# Altium schematic symbol library VJ0805Y104KXAMR.SchLib: 1 symbol
Pins are listed as number, name and electrical type; pins without a type are passive.

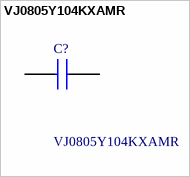
[diagram p0: symbol VJ0805Y104KXAMR]

## VJ0805Y104KXAMR
designator C?
Multilayer Ceramic Capacitors MLCC - SMD/SMT 0805 0.1uF 50volts X7R 10%; Manufacturer_Name: Vishay; Geometry.Height: 1.45mm; Mouser Part Number: 77-VJ0805Y104KXAMR; Mouser Price/Stock: https://www.mouser.co.uk/ProductDetail/Vishay-Vitramon/VJ0805Y104KXAMR?qs=iPOr8XgPdiSpDWrmTedxnA%3D%3D; Manufacturer_Part_Number: VJ0805Y104KXAMR; Datasheet Link: http://www.vishay.com/docs/45226/vj31xrohsautomlcc.pdf
footprint CAPC2012X145N
pins: 1, 2